# Altium footprint library Grant_..PcbLib: 97 footprints (part 3 of 7)
Each footprint in its own frame and in the unit in brackets; x right, y up, seen from the top. Pads: shape width x height; smd on the part's side, far side on the other; paste and mask are expansions set on the pad; w line width, h text height; cw(c..) or ccw(c..) is an arc to the next point about the centre after c.
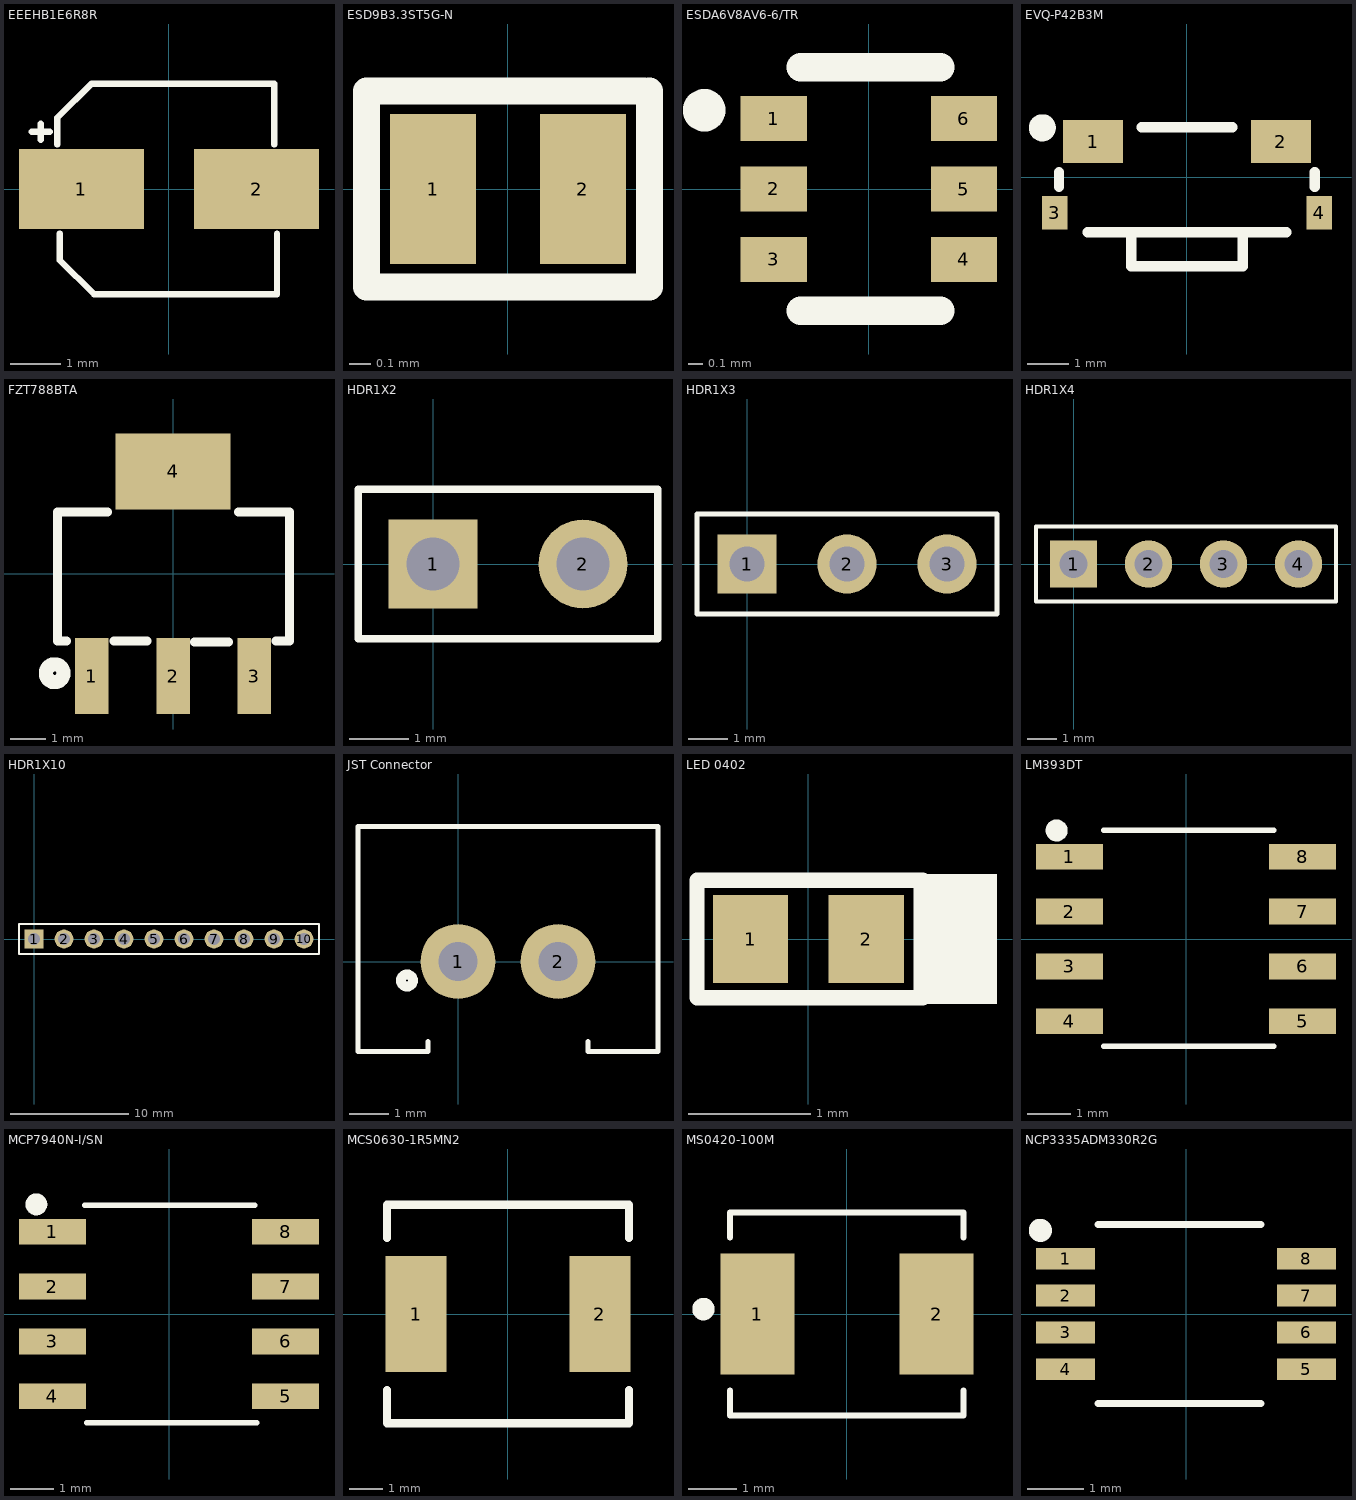
[diagram p2: the footprints below, top view; thin cyan lines are the x and y axes]

## EEEHB1E6R8R [mm] "EEE-HB1E6R8R"
pads (2):
  rect 2.5x1.6 smd: 1(-1.75,0) 2(1.75,0)
Top Overlay:
  lines w0.127: -2.742,1.143 -2.388,1.143 ; -2.565,0.986 -2.565,1.306 ; -2.235,0.891 -2.235,1.422 -1.549,2.108 2.108,2.108 2.108,0.89 ; -2.184,-0.891 -2.184,-1.422 -1.499,-2.108 2.159,-2.108 2.159,-0.89
3D body "EEEHB1E6R8R.STEP": height 5.8, standoff 0, extent -2.5,-2.15 2.5,2.15

## ESD9B3.3ST5G-N [mm] "TVS DIODE Bidirectional 3.3V (Max) 3.8V 8V 10A SOD923"
pads (2):
  rect 0.4x0.7 smd: 1(-0.35,0) 2(0.35,0)
Top Overlay:
  lines w0.127: 0.635,0.457 -0.66,0.457 -0.66,-0.457 0.66,-0.457 0.66,0.457
3D body "User Library-SOD-882D.step": height 0.43, standoff -0.04, extent -0.525,-0.325 0.525,0.325

## ESDA6V8AV6-6/TR [mm]
pads (6):
  rect 0.47x0.32 smd: 1(-0.675,0.5) 2(-0.675,0) 3(-0.675,-0.5) 4(0.675,-0.5) 5(0.675,0) 6(0.675,0.5)
Top Overlay:
  circle w0.2: c-1.168,0.559 r0.051
  lines w0.2: -0.483,-0.864 0.508,-0.864 ; -0.483,0.864 0.508,0.864
3D body "User Library-SOT-563.step": height 0.58, standoff 0, extent -0.813,-0.8 0.813,0.8

## EVQ-P42B3M [mm]
pads (4):
  rect 1.45x1.05 smd: 1(-2.275,0.863) 2(2.275,0.863)
  rect 0.62x0.82 smd: 3(-3.2,-0.863) 4(3.2,-0.863)
Top Overlay:
  circle w0.35: c-3.505,1.195 r0.152
  lines w0.254: -3.1,-0.238 -3.1,0.112 ; -2.4,-1.338 2.4,-1.338 ; -1.35,-1.388 -1.35,-2.163 1.35,-2.163 1.35,-1.388 ; -1.1,1.212 1.1,1.212 ; 3.1,-0.238 3.1,0.112
3D body "EVQP42B3M.STEP": height 2, standoff -1, extent -3.074,-2.132 3.126,1.368

## FZT788BTA [mm]
pads (4):
  rect 0.95x2.15 smd: 1(-2.3,-2.9) 2(0,-2.9) 3(2.3,-2.9)
  rect 3.25x2.15 smd: 4(0,2.9)
Top Overlay:
  circle w0.4: c-3.353,-2.819 r0.251
  lines w0.254: -3.023,-1.905 -3.277,-1.905 -3.277,1.753 -1.854,1.753 ; -1.676,-1.905 -0.737,-1.905 ; 0.61,-1.93 1.575,-1.93 ; 1.854,1.753 3.302,1.753 3.302,-1.905 2.921,-1.905
3D body "CircuitWorks-SOT-223.STEP": height 1.65, standoff -0.03, extent -3.275,-3.505 3.225,3.455

## HDR1X2 [mm] "CONN HEADER VERT 2POS 2.54MM"
pads (2):
  rect 1.5x1.5 hole 0.9: 1(0,0)
  round 1.5 hole 0.9: 2(2.54,0)
Top Overlay:
  lines w0.127: -1.27,-1.27 -1.27,1.27 3.81,1.27 3.81,-1.27 -1.27,-1.27
3D body "User Library-Header1x2.STEP": height 8.44, standoff -2.54, extent -1.27,-1.27 3.81,1.27

## HDR1X3 [mm] "Connector; Header; 3 Position"
pads (3):
  rect 1.5x1.5 hole 0.9: 1(0,0)
  round 1.5 hole 0.9: 2(2.54,0) 3(5.08,0)
Top Overlay:
  lines w0.127: -1.27,-1.27 -1.27,1.27 6.35,1.27 6.35,-1.27 -1.27,-1.27
3D body "User Library-Header_Male_3Pin.STEP": height 8.54, standoff -3, extent -1.27,-1.245 6.35,1.245

## HDR1X4 [mm] "Connector; Header; 4 Position"
pads (4):
  rect 1.6x1.6 hole 0.95: 1(0,0)
  round 1.6 hole 0.95: 2(2.54,0) 3(5.08,0) 4(7.62,0)
Top Overlay:
  lines w0.127: -1.27,-1.27 8.89,-1.27 8.89,1.27 -1.27,1.27 -1.27,-1.27
3D body "User Library-1x4 TH Pitch 2_54mm.STEP": height 9.5, standoff -3.2, extent -1.27,-1.27 8.89,1.27

## HDR1X10 [mm] "Connector; Header; 10 Position"
pads (10):
  rect 1.6x1.6 hole 1: 1(0,0)
  round 1.6 hole 1: 2(2.54,0) 3(5.08,0) 4(7.62,0) 5(10.16,0) 6(12.7,0) 7(15.24,0) 8(17.78,0) 9(20.32,0) 10(22.86,0)
Top Overlay:
  lines w0.2: -1.27,-1.27 -1.27,1.27 0.635,1.27 24.13,1.27 24.13,-1.27 -1.27,-1.27
3D body "User Library-1x10 TH Pitch 2_54mm.STEP": height 9.4, standoff -3.3, extent -1.27,-1.27 24.13,1.27

## JST Connector [mil] "2 Pin JST Connector"
pads (2):
  round 75 hole 39: 1(0,0) 2(100,0)
Top Overlay:
  circle w10: c-51,-19 r6
  lines w5: -30,-80 -30,-90 -100,-90 -100,135 200,135 200,-90 130,-90 130,-80
3D body "User Library-PW10-XX-M blue.step": height 283.59, standoff -121.92, extent -97.64,-89.41 197.64,135

## LED 0402 [mm]
pads (2):
  rect 0.62x0.72 smd: 1(-0.475,0) 2(0.475,0)
Top Overlay:
  rectangle: 0.864,-0.533 1.549,0.533
  lines w0.127: 0.94,-0.483 -0.914,-0.483 -0.914,0.483 0.94,0.483
3D body "User Library-LED-0402.step": height 0.45, standoff 0, extent -0.505,-0.25 0.505,0.25

## LM393DT [mm]
pads (8):
  rect 1.55x0.6 smd: 1(-2.7,1.905) 2(-2.7,0.635) 3(-2.7,-0.635) 4(-2.7,-1.905) 5(2.7,-1.905) 6(2.7,-0.635) 7(2.7,0.635) 8(2.7,1.905)
Top Overlay:
  circle w0.254: c-2.997,2.515 r0.127
  lines w0.127: -1.905,-2.489 2.032,-2.489 ; -1.905,2.515 2.032,2.515
3D body "User Library-SOIC-8-1.STEP": height 1.65, standoff -0.1, extent -3,-2.45 3,2.45

## MCP7940N-I/SN [mm]
pads (8):
  rect 1.55x0.6 smd: 1(-2.7,1.905) 2(-2.7,0.635) 3(-2.7,-0.635) 4(-2.7,-1.905) 5(2.7,-1.905) 6(2.7,-0.635) 7(2.7,0.635) 8(2.7,1.905)
Top Overlay:
  circle w0.254: c-3.073,2.54 r0.127
  lines w0.127: -1.956,2.515 1.981,2.515 ; -1.905,-2.515 2.032,-2.515
3D body "User Library-SOIC-8-1.STEP": height 1.65, standoff -0.1, extent -3,-2.45 3,2.45

## MCS0630-1R5MN2 [mm]
pads (2):
  rect 1.85x3.5 smd: 1(-2.775,0) 2(2.775,0)
Top Overlay:
  lines w0.254: -3.65,-2.294 -3.65,-3.3 0,-3.3 3.65,-3.3 3.65,-2.294 ; -3.65,2.294 -3.65,3.3 0,3.3 3.65,3.3 3.65,2.294
3D body "mcs0630.stp": height 3, standoff 0, extent -3.65,-3.3 3.65,3.3

## MS0420-100M [mm]
pads (2):
  rect 1.52x2.5 smd: 1(-1.85,0) 2(1.85,0)
Top Overlay:
  circle w0.254: c-2.966,0.102 r0.105
  lines w0.127: -2.42,-1.588 -2.42,-2.1 -0.045,-2.1 2.406,-2.1 2.406,-1.588 ; -2.42,1.588 -2.42,2.1 -0.045,2.1 2.406,2.1 2.406,1.588
3D body "COILMX MS0420-4R7M.STEP": height 1.85, standoff -0.15, extent -2.375,-2.1 2.375,2.1

## NCP3335ADM330R2G [mm]
pads (8):
  rect 1.04x0.38 smd: 1(-2.12,0.975) 2(-2.12,0.325) 3(-2.12,-0.325) 4(-2.12,-0.975) 5(2.12,-0.975) 6(2.12,-0.325) 7(2.12,0.325) 8(2.12,0.975)
Top Overlay:
  circle w0.254: c-2.565,1.473 r0.076
  lines w0.127: -1.549,-1.575 1.321,-1.575 ; -1.549,1.575 1.321,1.575
3D body "User Library-MSOP-8 MSOP-8L.step": height 1.01, standoff 0, extent -2.46,-1.525 2.461,1.525